# Altium footprint library SamacSys.PcbLib: 1008 footprints (part 63 of 63)
Each footprint in its own frame and in the unit in brackets; x right, y up, seen from the top. Pads: shape width x height; smd on the part's side, far side on the other; paste and mask are expansions set on the pad; w line width, h text height; cw(c..) or ccw(c..) is an arc to the next point about the centre after c.
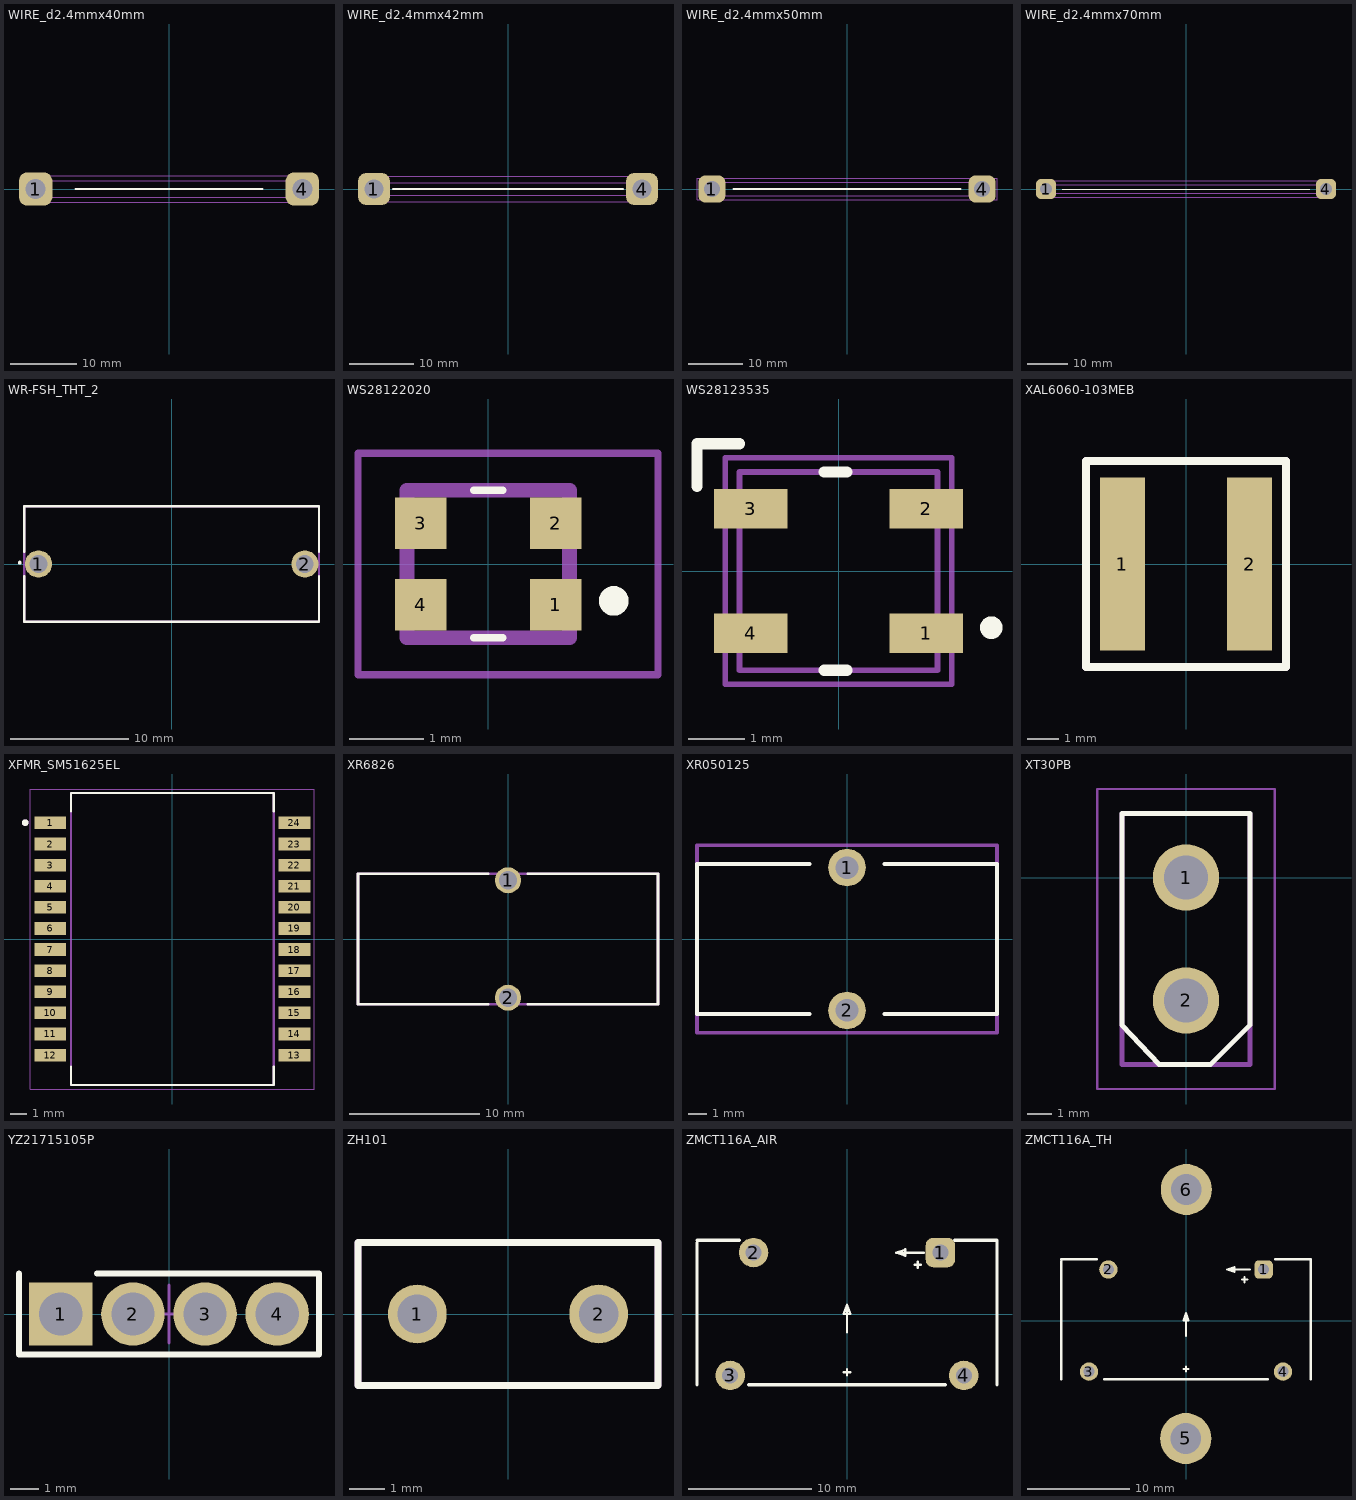
[diagram p62: the footprints below, top view; thin cyan lines are the x and y axes]

## WIRE_d2.4mmx40mm [mm] "ПЭТВ-2 d2.5mm х 40mm"
height 4
pads (2):
  rrect50% 5x5 hole 3: 1(-20,0) 4(20,0)
Top Overlay:
  lines w0.3: -14,0 14,0
Assembly:
  lines w0.1: -22,-1.25 -22,1.25 20.828,1.25 20.828,-1.25 -22,-1.25
Countryard:
  lines w0.1: -22,-2 22,-2 22,2 -22,2 -22,-2
3D body "ПЭТВ2_40.STEP": height 9.25, standoff -2, extent -21.25,-1.25 21.25,1.25

## WIRE_d2.4mmx42mm [mm] "ПЭТВ-2 d2.5mm х 42mm"
height 4
pads (2):
  rrect50% 5x5 hole 3: 1(-21,0) 4(21,0)
Top Overlay:
  lines w0.3: -18,0 18,0
Assembly:
  lines w0.1: -22,-1 -22,1 20.828,1 20.828,-1 -22,-1
Countryard:
  lines w0.1: -22,-2 22,-2 22,2 -22,2 -22,-2
3D body "ПЭТВ2_42.STEP": height 9.25, standoff -2, extent -22.25,-1.25 22.25,1.25

## WIRE_d2.4mmx50mm [mm] "ПЭТВ-2 d2.5mm х 50mm"
height 4
pads (2):
  rrect50% 5x5 hole 3: 1(-25,0) 4(25,0)
Top Overlay:
  lines w0.3: -21,0 21,0
Assembly:
  lines w0.1: -26,-1.25 26,-1.25 26,1.25 -26,1.25 -26,-1.25
Countryard:
  lines w0.1: -27.75,-2 27.75,-2 27.75,2 -27.75,2 -27.75,-2
3D body "ПЭТВ2_50.SLDPRT": height 9.24, standoff -2, extent -26.241,-1.25 26.241,1.25

## WIRE_d2.4mmx70mm [mm] "ПЭТВ-2 d2.5mm х 70mm"
height 4
pads (2):
  rrect50% 5x5 hole 3: 1(-35,0) 4(35,0)
Top Overlay:
  lines w0.3: -31,0 31,0
Assembly:
  lines w0.1: -35,-1 -35,1 35,1 35,-1 -35,-1
Countryard:
  lines w0.1: -36,-2 36,-2 36,2 -36,2 -36,-2
3D body "ПЭТВ2_70.STEP": height 9.25, standoff -2, extent -36.25,-1.25 36.25,1.25

## WR-FSH_THT_2 [mm]
pads (2):
  round 2.3 hole 1.5: 1(-11.3,0) 2(11.3,0)
Top Overlay:
  circle w0.2: c-12.887,0.113 r0.066
  lines w0.2: -12.5,-1.023 -12.5,-4.9 12.5,-4.9 12.5,-1.023 ; -12.5,1.023 -12.5,4.9 12.5,4.9 12.5,1.023
Assembly:
  lines w0.2: -12.5,-4.9 12.5,-4.9 12.5,4.9 -12.5,4.9 -12.5,-4.9
3D body "696108003002.stp": height 13.36, standoff -3.48, extent -12.2,-4.7 12.2,4.7

## WS28122020 [mm]
pads (4):
  rect 0.7x0.7 smd: 1(0.915,-0.55) 2(0.915,0.55) 3(-0.915,0.55) 4(-0.915,-0.55)
Top Overlay:
  lines w0.1: -0.2,-1 0.2,-1 ; -0.2,1 0.2,1
  lines w0.2: 1.7,-0.6 cw(c1.7,-0.5) 1.7,-0.4 cw(c1.7,-0.5) 1.7,-0.6
Assembly:
  lines w0.2: -1.1,-1 1.1,-1 1.1,1 -1.1,1 -1.1,-1
Countryard:
  lines w0.1: -1.765,-1.5 2.3,-1.5 2.3,1.5 -1.765,1.5 -1.765,-1.5
3D body "WS2812-2020.stp": height 0.84, standoff -0.01, extent -1.1,-1 1.1,1

## WS28123535 [mm]
pads (4):
  rect 1.3x0.7 smd: 1(1.55,-1.1) 2(1.55,1.1) 3(-1.55,1.1) 4(-1.55,-1.1)
Top Overlay:
  lines w0.2: -2.5,1.5 -2.5,2.25 -1.75,2.25 ; -0.25,-1.75 0.15,-1.75 ; -0.25,1.75 0.15,1.75 ; 2.7,-1.1 ccw(c2.7,-1) 2.7,-0.9 ccw(c2.7,-1) 2.7,-1.1
Top Assembly:
  lines w0.1: -1.75,-1.75 -1.75,1.75 1.75,1.75 1.75,-1.75 -1.75,-1.75
Countryard:
  lines w0.1: -2,-2 2,-2 2,2 -2,2 -2,-2
3D body "WS2812-2020.stp": height 0.84, standoff -0.01, extent -1.1,-1 1.1,1

## XAL6060-103MEB [mm]
pads (2):
  rect 1.43x5.5 smd: 1(-2.02,0) 2(2.02,0)
Top Overlay:
  lines w0.254: -3.18,-3.28 -3.18,3.28 3.18,3.28 3.18,-3.28 -3.18,-3.28
Assembly:
  lines w0.254: -3.18,-3.28 3.18,-3.28 3.18,3.28 -3.18,3.28 -3.18,-3.28

## XFMR_SM51625EL [mm]
pads (24):
  rect 1.9x0.76 smd: 1(-7.35,6.985) 2(-7.35,5.715) 3(-7.35,4.445) 4(-7.35,3.175) 5(-7.35,1.905) 6(-7.35,0.635) 7(-7.35,-0.635) 8(-7.35,-1.905) 9(-7.35,-3.175) 10(-7.35,-4.445) 11(-7.35,-5.715) 12(-7.35,-6.985) 13(7.35,-6.985) 14(7.35,-5.715) 15(7.35,-4.445) 16(7.35,-3.175) 17(7.35,-1.905) 18(7.35,-0.635) 19(7.35,0.635) 20(7.35,1.905) 21(7.35,3.175) 22(7.35,4.445) 23(7.35,5.715) 24(7.35,6.985)
Top Overlay:
  circle w0.2: c-8.85,7 r0.1
  lines w0.127: -6.1,-7.685 -6.1,-8.775 6.1,-8.775 6.1,-7.685 ; -6.1,7.685 -6.1,8.775 6.1,8.775 6.1,7.685
Assembly:
  circle w0.2: c-8.85,7 r0.1
  lines w0.127: -6.1,-8.775 -6.1,8.775 6.1,8.775 6.1,-8.775 -6.1,-8.775
Countryard:
  lines w0.05: -8.55,-9.025 -8.55,9.025 8.55,9.025 8.55,-9.025 -8.55,-9.025
3D body "step_temp.STEP": height 6.25, standoff 0, extent -8,-8.775 8,8.775

## XR6826 [mm]
pads (2):
  round 2 hole 1.4: 1(0,4.5) 2(0,-4.5)
Top Overlay:
  lines w0.2: -1.5,-5 -11.5,-5 -11.5,5 -1.5,5 ; 1.5,-5 11.5,-5 11.5,5 1.5,5
Assembly:
  lines w0.2: -11.5,-5 11.5,-5 11.5,5 -11.5,5 -11.5,-5

## XR050125 [mm]
pads (2):
  round 2 hole 1.2: 1(0,3.81) 2(0,-3.81)
Top Overlay:
  lines w0.2: -2,-4 -8,-4 -8,4 -2,4 ; 2,-4 8,-4 8,4 2,4
Assembly:
  lines w0.2: -8,-5 -8,5 8,5 8,-5 -8,-5

## XT30PB [mm]
pads (2):
  round 2.7 hole 1.8: 1(0,0) 2(0,-5)
Top Overlay:
  lines w0.2: -2.6,-6 -1.1,-7.6 1,-7.6 2.6,-6 2.6,2.6 -2.6,2.6 -2.6,-6
Assembly:
  lines w0.2: -2.6,-7.6 2.6,-7.6 2.6,2.6 -2.6,2.6 -2.6,-7.6
Countryard:
  lines w0.1: -3.6,-8.6 3.6,-8.6 3.6,3.6 -3.6,3.6 -3.6,-8.6
3D body "XT30PB.stp": height 10.66, standoff -2.04, extent -2.6,-7.6 2.6,2.6

## YZ21715105P [mm]
height 4.3
pads (4):
  rect 2.2x2.2 hole 1.5: 1(-3.75,0)
  round 2.2 hole 1.5: 2(-1.25,0) 3(1.25,0) 4(3.75,0)
Top Overlay:
  lines w0.2: -5.2,1.4 -5.2,-1.4 5.2,-1.4 5.2,1.4 -2.5,1.4
Countryard:
  lines w0.1: -1,0 1,0 ; 0,-1 0,1

## ZH101 [mm] "MicroFuse"
height 8
pads (2):
  round 1.65 hole 1.1: 1(-2.54,0) 2(2.54,0)
Top Overlay:
  lines w0.2: -4.2,-2 -4.2,2 4.2,2 4.2,-2 -4.2,-2
Top Assembly:
  lines w0.2: -4.2,-2 -4.2,2 4.2,2 4.2,-2 -4.2,-2
3D body "RSTA-3.15-BULK--3DModel-STEP-56544.STEP": height 8.1, standoff -4.6, extent -4.175,-2 4.175,2

## ZMCT116A_AIR [mm] "Current Cransformer"
pads (4):
  rrect50% 2.4x2.4 hole 1.3: 1(7.6,5)
  round 2.4 hole 1.3: 2(-7.6,5) 3(-9.5,-5) 4(9.5,-5)
Top Overlay:
  lines w0.2: -0.25,-4.75 0.25,-4.75 ; 0,-5 0,-4.5 ; 0,-1.5 0,0.75 ; 5.5,4 6,4 ; 5.75,3.75 5.75,4.25 ; 6.25,5 4,5 ; 0,0.75 -0.25,0 0.25,0 0,0.75 ; 4,5 4.75,4.75 4.75,5.25 4,5
  lines w0.254: -12.2,-5.75 -12.2,5.8 ; -12.2,6 -8.75,6 ; -8,-5.75 8,-5.75 ; 8.75,6 12.2,6 12.2,-5.75
3D body "ZMCT116A.STEP": height 26, standoff -4, extent -12,-5.75 12,5.75

## ZMCT116A_TH [mm] "Current Cransformer"
pads (6):
  rrect50% 1.8x1.8 hole 1.1: 1(7.6,5)
  round 1.8 hole 1.1: 2(-7.6,5) 3(-9.5,-5) 4(9.5,-5)
  round 5 hole 3: 5(-0.023,-11.547) 6(0.035,12.829)
Top Overlay:
  lines w0.2: -0.25,-4.75 0.25,-4.75 ; 0,-5 0,-4.5 ; 0,-1.5 0,0.75 ; 5.5,4 6,4 ; 5.75,3.75 5.75,4.25 ; 6.25,5 4,5 ; 0,0.75 0.25,0 -0.25,0 0,0.75 ; 4,5 4.75,5.25 4.75,4.75 4,5
  lines w0.254: -12.2,-5.75 -12.2,5.8 ; -12.2,6 -8.75,6 ; -8,-5.75 8,-5.75 ; 8.75,6 12.2,6 12.2,-5.75
3D body "ZMCT116A.STEP": height 26, standoff -4, extent -12,-5.75 12,5.75